# EAGLE library part DW01+G (library DW01+G)
One Cell Lithium-ion/Polymer Battery Protection IC Source: Datasheet <https://datasheet.lcsc.com/szlcsc/Fortune-Semicon-DW01-G_C14213.pdf>
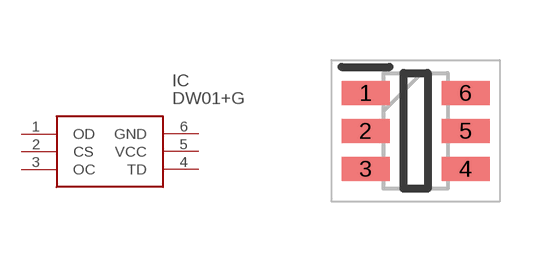
[diagram p0: symbol with the pads of SOT95P280X145-6N; footprint SOT95P280X145-6N]

Designator prefix IC

## DW01+G (Description: One Cell Lithium-ion/Polymer Battery Protection IC; Height: 1.45mm; Manufacturer_Name: Fortune Semiconductor Corporation; Manufacturer_Part_Number: DW01+G)  [SOT95P280X145-6N]
1  OD
2  CS
3  OC
4  TD
5  VCC
6  GND

## Footprint SOT95P280X145-6N (pad centres in mm)
sot-23-6,
smd 1.2 x 0.6: 1 -1.25,0.95; 2 -1.25,0; 3 -1.25,-0.95; 4 1.25,-0.95; 5 1.25,0; 6 1.25,0.95